# Altium schematic symbol library 2019-09-10_14-26-32.SchLib: 2 symbols
Pins are listed as number, name and electrical type; pins without a type are passive.

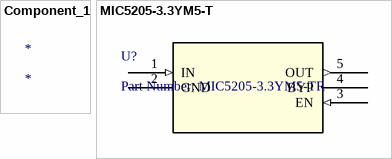
[diagram p0: symbols Component_1 to MIC5205-3.3YM5-T]

## Component_1
designator *

## MIC5205-3.3YM5-T
designator U?, comment Part Number: MIC5205-3.3YM5-TR
No Description Available; Vendor: Microchip; Built_By: EMA_Jessica; Manufacturer_Part_Number: MIC5205-3.3YM5-TR; Copyright: Copyright (C) 2016 Accelerated Designs. All rights reserved; RefDes: RefDes; Type: DEV; Value: Value
footprint SOT-23-5_MC
pins: 1 IN (in), 2 GND (power), 3 EN (in), 4 BYP, 5 OUT (out)